# Altium footprint library 2S-Li-ion-Charger.PcbLib: 14 footprints
Each footprint in its own frame and in the unit in brackets; x right, y up, seen from the top. Pads: shape width x height; smd on the part's side, far side on the other; paste and mask are expansions set on the pad; w line width, h text height; cw(c..) or ccw(c..) is an arc to the next point about the centre after c.
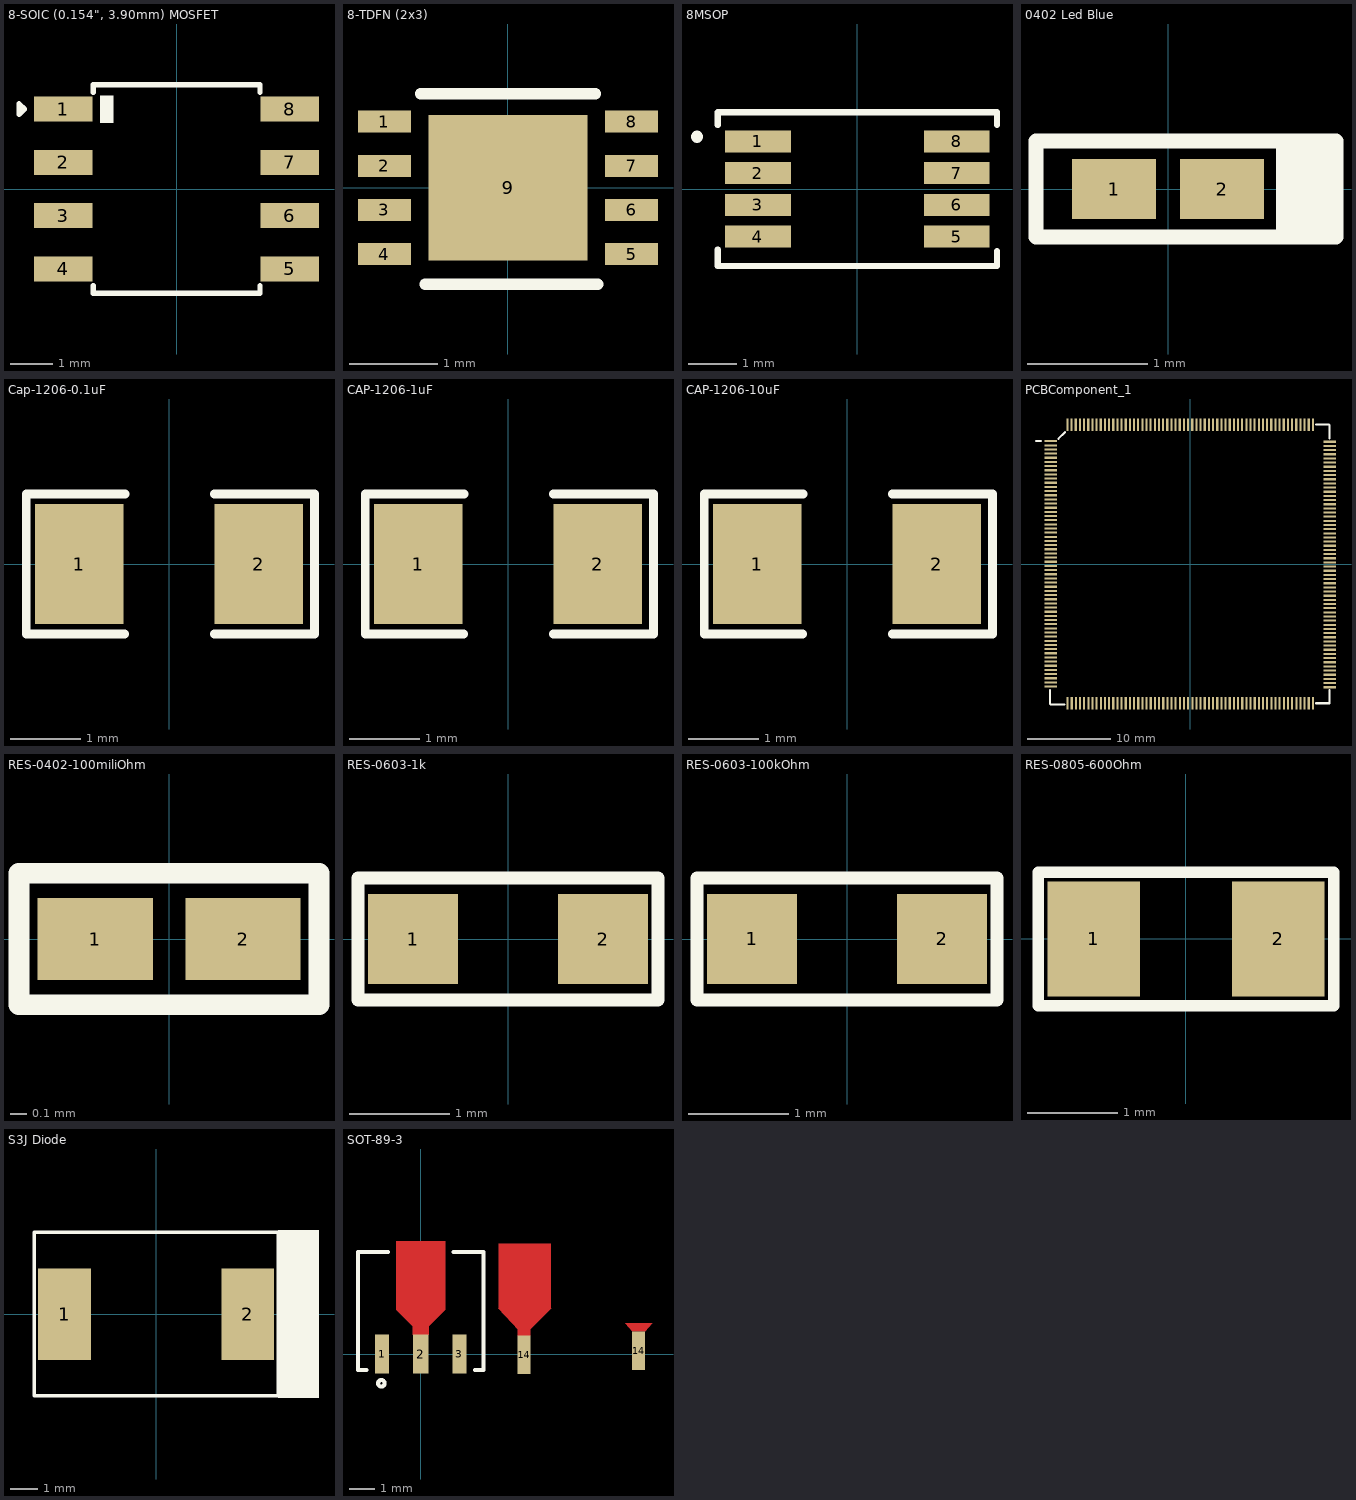
[diagram p0: the footprints below, top view; thin cyan lines are the x and y axes]

## 8-SOIC (0.154", 3.90mm) MOSFET [mm] "STS5P3LLH6"
pads (8):
  rect 1.4x0.6 smd: 1(-2.7,1.905) 2(-2.7,0.635) 3(-2.7,-0.635) 4(-2.7,-1.905) 5(2.7,-1.905) 6(2.7,-0.635) 7(2.7,0.635) 8(2.7,1.905)
Top Overlay:
  rectangle: -1.829,1.575 -1.499,2.235
  lines w0.127: -1.991,-2.311 -1.991,-2.489 1.991,-2.489 1.991,-2.311 ; -1.991,2.311 -1.991,2.489 1.991,2.489 1.991,2.311 ; -3.759,1.778 -3.632,1.905 -3.759,2.032 -3.759,1.778
3D body "User Library-SOIC-8-1.STEP": height 1.7, standoff -0.05, extent -3,-2.45 3,2.45

## 8-TDFN (2x3) [mm] "MAX17044"
pads (9):
  rect 0.6x0.25 smd: 1(-1.4,0.75) 2(-1.4,0.25) 3(-1.4,-0.25) 4(-1.4,-0.75) 5(1.4,-0.75) 6(1.4,-0.25) 7(1.4,0.25) 8(1.4,0.75)
  rect 1.8x1.65 smd: 9(0,0)
Top Overlay:
  lines w0.127: -0.991,1.067 0.991,1.067 ; -0.94,-1.092 1.016,-1.092
3D body "21-0174_T8231_MXM.step": height 0.81, standoff 0, extent -1.524,-1.029 1.524,1.029

## 8MSOP [mm] "MCP73844"
pads (8):
  rect 1.35x0.45 smd: 1(-2.037,0.975) 2(-2.037,0.325) 3(-2.037,-0.325) 4(-2.037,-0.975) 5(2.038,-0.975) 6(2.038,-0.325) 7(2.038,0.325) 8(2.038,0.975)
Top Overlay:
  lines w0.127: -2.863,-1.242 -2.863,-1.577 2.862,-1.577 2.862,-1.274 ; -2.863,1.311 -2.863,1.575 -1.431,1.575 1.431,1.575 2.862,1.575 2.862,1.317
  lines w0.254: -3.287,1.073 -3.287,1.073
3D body "MSOP8_MC_MCH.step": height 1.1, standoff 0, extent -2.512,-1.502 2.388,1.498

## 0402 Led Blue [mm] "APHHS1005QBC/D"
pads (2):
  rect 0.7x0.5 smd: 1(-0.45,0) 2(0.45,0)
Top Overlay:
  rectangle: 0.9,-0.4 1.4,0.4
  lines w0.127: -1.1,-0.4 1.4,-0.4 1.4,0.4 -1.1,0.4 -1.1,-0.4
3D body "LED_SMD_1XP5_KNB.step": height 0.51, standoff 0, extent -0.495,-0.254 0.495,0.254

## Cap-1206-0.1uF [mm] "T491A104K035AT"
pads (2):
  rect 1.25x1.7 smd: 1(-1.27,0) 2(1.27,0)
Top Overlay:
  lines w0.127: -0.627,-0.991 -2.018,-0.991 -2.018,0.991 -0.625,0.991 ; 0.641,0.991 2.057,0.991 2.057,-0.991 0.645,-0.991
3D body "User Library-1206 SMD Capacitor.step": height 1, standoff 0, extent -1.599,-0.799 1.601,0.801

## CAP-1206-1uF [mm] "T491A105K050AT"
pads (2):
  rect 1.25x1.7 smd: 1(-1.27,0) 2(1.27,0)
Top Overlay:
  lines w0.127: -0.627,-0.991 -2.018,-0.991 -2.018,0.991 -0.625,0.991 ; 0.641,0.991 2.057,0.991 2.057,-0.991 0.645,-0.991
3D body "User Library-1206 SMD Capacitor.step": height 1, standoff 0, extent -1.599,-0.799 1.601,0.801

## CAP-1206-10uF [mm] "T491A106K010AT"
pads (2):
  rect 1.25x1.7 smd: 1(-1.27,0) 2(1.27,0)
Top Overlay:
  lines w0.127: -0.627,-0.991 -2.018,-0.991 -2.018,0.991 -0.625,0.991 ; 0.641,0.991 2.057,0.991 2.057,-0.991 0.645,-0.991
3D body "User Library-1206 SMD Capacitor.step": height 1, standoff 0, extent -1.599,-0.799 1.601,0.801

## PCBComponent_1 [mil]
pads (240):
  rect 59.84x10 smd: 1(-659.87,581.36) 2(-659.87,561.68) 3(-659.87,541.99) 4(-659.87,522.31) 5(-659.87,502.62) 6(-659.87,482.94) 7(-659.87,463.25) 8(-659.87,443.57) 9(-659.87,423.88) 10(-659.87,404.2) 11(-659.87,384.51) 12(-659.87,364.83) 13(-659.87,345.14) 14(-659.87,325.46) 15(-659.87,305.77) 16(-659.87,286.09) 17(-659.87,266.4) 18(-659.87,246.72) 19(-659.87,227.03) 20(-659.87,207.35) 21(-659.87,187.66) 22(-659.87,167.98) 23(-659.87,148.29) 24(-659.87,128.61) 25(-659.87,108.92) 26(-659.87,89.24) 27(-659.87,69.55) 28(-659.87,49.87) 29(-659.87,30.18) 30(-659.87,10.5) 31(-659.87,-9.19) 32(-659.87,-28.87) 33(-659.87,-48.56) 34(-659.87,-68.24) 35(-659.87,-87.93) 36(-659.87,-107.61) 37(-659.87,-127.3) 38(-659.87,-146.98) 39(-659.87,-166.67) 40(-659.87,-186.35) 41(-659.87,-206.04) 42(-659.87,-225.72) 43(-659.87,-245.41) 44(-659.87,-265.09) 45(-659.87,-284.78) 46(-659.87,-304.46) 47(-659.87,-324.15) 48(-659.87,-343.83) 49(-659.87,-363.52) 50(-659.87,-383.2) 51(-659.87,-402.89) 52(-659.87,-422.57) 53(-659.87,-442.26) 54(-659.87,-461.94) 55(-659.87,-481.63) 56(-659.87,-501.31) 57(-659.87,-521) 58(-659.87,-540.68) 59(-659.87,-560.37) 60(-659.87,-580.05) 121(659.87,-583.12) 122(659.87,-563.44) 123(659.87,-543.75) 124(659.87,-524.07) 125(659.87,-504.38) 126(659.87,-484.7) 127(659.87,-465.01) 128(659.87,-445.33) 129(659.87,-425.64) 130(659.87,-405.96) 131(659.87,-386.27) 132(659.87,-366.59) 133(659.87,-346.9) 134(659.87,-327.22) 135(659.87,-307.53) 136(659.87,-287.85) 137(659.87,-268.16) 138(659.87,-248.48) 139(659.87,-228.79) 140(659.87,-209.11) 141(659.87,-189.42) 142(659.87,-169.74) 143(659.87,-150.05) 144(659.87,-130.37) 145(659.87,-110.68) 146(659.87,-91) 147(659.87,-71.31) 148(659.87,-51.63) 149(659.87,-31.94) 150(659.87,-12.26) 151(659.87,7.43) 152(659.87,27.11) 153(659.87,46.8) 154(659.87,66.48) 155(659.87,86.17) 156(659.87,105.85) 157(659.87,125.54) 158(659.87,145.22) 159(659.87,164.91) 160(659.87,184.59) 161(659.87,204.28) 162(659.87,223.96) 163(659.87,243.65) 164(659.87,263.33) 165(659.87,283.02) 166(659.87,302.7) 167(659.87,322.39) 168(659.87,342.07) 169(659.87,361.76) 170(659.87,381.44) 171(659.87,401.13) 172(659.87,420.81) 173(659.87,440.5) 174(659.87,460.18) 175(659.87,479.87) 176(659.87,499.55) 177(659.87,519.24) 178(659.87,538.92) 179(659.87,558.61) 180(659.87,578.29)
  rect 10x59.84 smd: 61(-580.73,-659.19) 62(-561.05,-659.19) 63(-541.36,-659.19) 64(-521.68,-659.19) 65(-501.99,-659.19) 66(-482.31,-659.19) 67(-462.62,-659.19) 68(-442.94,-659.19) 69(-423.25,-659.19) 70(-403.57,-659.19) 71(-383.88,-659.19) 72(-364.2,-659.19) 73(-344.51,-659.19) 74(-324.83,-659.19) 75(-305.14,-659.19) 76(-285.46,-659.19) 77(-265.77,-659.19) 78(-246.09,-659.19) 79(-226.4,-659.19) 80(-206.72,-659.19) 81(-187.03,-659.19) 82(-167.35,-659.19) 83(-147.66,-659.19) 84(-127.98,-659.19) 85(-108.29,-659.19) 86(-88.61,-659.19) 87(-68.92,-659.19) 88(-49.24,-659.19) 89(-29.55,-659.19) 90(-9.87,-659.19) 91(9.82,-659.19) 92(29.5,-659.19) 93(49.19,-659.19) 94(68.87,-659.19) 95(88.56,-659.19) 96(108.24,-659.19) 97(127.93,-659.19) 98(147.61,-659.19) 99(167.3,-659.19) 100(186.98,-659.19) 101(206.67,-659.19) 102(226.35,-659.19) 103(246.04,-659.19) 104(265.72,-659.19) 105(285.41,-659.19) 106(305.09,-659.19) 107(324.78,-659.19) 108(344.46,-659.19) 109(364.15,-659.19) 110(383.83,-659.19) 111(403.52,-659.19) 112(423.2,-659.19) 113(442.89,-659.19) 114(462.57,-659.19) 115(482.26,-659.19) 116(501.94,-659.19) 117(521.63,-659.19) 118(541.31,-659.19) 119(561,-659.19) 120(580.68,-659.19) 181(580.4,659.19) 182(560.71,659.19) 183(541.03,659.19) 184(521.34,659.19) 185(501.66,659.19) 186(481.97,659.19) 187(462.29,659.19) 188(442.6,659.19) 189(422.92,659.19) 190(403.23,659.19) 191(383.55,659.19) 192(363.86,659.19) 193(344.18,659.19) 194(324.49,659.19) 195(304.81,659.19) 196(285.12,659.19) 197(265.44,659.19) 198(245.75,659.19) 199(226.07,659.19) 200(206.38,659.19) 201(186.7,659.19) 202(167.01,659.19) 203(147.33,659.19) 204(127.64,659.19) 205(107.95,659.19) 206(88.27,659.19) 207(68.58,659.19) 208(48.9,659.19) 209(29.21,659.19) 210(9.53,659.19) 211(-10.16,659.19) 212(-29.84,659.19) 213(-49.53,659.19) 214(-69.21,659.19) 215(-88.9,659.19) 216(-108.58,659.19) 217(-128.27,659.19) 218(-147.95,659.19) 219(-167.64,659.19) 220(-187.32,659.19) 221(-207.01,659.19) 222(-226.69,659.19) 223(-246.38,659.19) 224(-266.06,659.19) 225(-285.75,659.19) 226(-305.43,659.19) 227(-325.12,659.19) 228(-344.8,659.19) 229(-364.49,659.19) 230(-384.17,659.19) 231(-403.86,659.19) 232(-423.54,659.19) 233(-443.23,659.19) 234(-462.91,659.19) 235(-482.6,659.19) 236(-502.28,659.19) 237(-521.97,659.19) 238(-541.65,659.19) 239(-561.34,659.19) 240(-581.02,659.19)
Top Overlay:
  lines w10: -729.99,582.26 -706.37,582.26 ; -663.06,-662.82 -663.06,-596.88 ; -661.09,-664.79 -596.13,-664.79 ; -624.34,591.95 -592.85,623.45 ; 596.04,-658.79 659.03,-658.79 659.03,-595.8 ; 596.04,660.11 655.09,660.11 659.03,656.17 659.03,593.18
3D body "PQFN240_A-4P10_INT.step": height 161.1, standoff 0, extent -681.97,-691.81 680,670.16

## RES-0402-100miliOhm [mm] "PE0402FRF470R1L"
pads (2):
  rect 0.7x0.5 smd: 1(-0.45,0) 2(0.45,0)
Top Overlay:
  lines w0.127: -0.914,-0.4 0.911,-0.4 0.911,0.4 -0.914,0.4 -0.914,-0.4
3D body "PE0402FRF470R1L.STEP": height 0.5, standoff 0, extent -0.475,-0.25 0.525,0.25

## RES-0603-1k [mm] "RT0603FRE071KL"
pads (2):
  rect 0.9x0.9 smd: 1(-0.95,0) 2(0.95,0)
Top Overlay:
  lines w0.127: -1.5,-0.61 -1.5,0.61 1.5,0.61 1.5,-0.61 -1.5,-0.61
3D body "RC0603N_YAG.step": height 0.71, standoff 0, extent -0.8,-0.406 0.8,0.406

## RES-0603-100kOhm [mm] "RT0603WRE07100KL"
pads (2):
  rect 0.9x0.9 smd: 1(-0.95,0) 2(0.95,0)
Top Overlay:
  lines w0.127: -1.5,-0.61 -1.5,0.61 1.5,0.61 1.5,-0.61 -1.5,-0.61
3D body "RC0603N_YAG.step": height 0.71, standoff 0, extent -0.8,-0.406 0.8,0.406

## RES-0805-600Ohm [mil] "CRCW0805600RFKEAHP"
pads (2):
  rect 40x50 smd: 1(-40,0) 2(40,0)
Top Overlay:
  lines w5: -64,-29 64,-29 64,29 -64,29 -64,-29
3D body "User Library-CR2012-0805.STEP": height 23.62, standoff 0, extent -39.34,-24.75 39.4,24.46

## S3J Diode [mm]
pads (2):
  rect 1.96x3.39 smd: 1(-3.4,0) 2(3.4,0)
Top Overlay:
  rectangle: 4.525,-3.099 6.049,3.124
  lines w0.127: -4.525,-3.025 4.525,-3.025 4.525,3.05 -4.525,3.05 -4.525,-3.025
  lines w0.254: 5.075,1 5.1,1 5.088,1
3D body "SMC.step": height 2.27, standoff 0, extent -3.97,-2.953 3.97,2.953

## SOT-89-3 [mm] "L78L33ACUTR Regulator"
pads (5):
  rect 0.533x1.499 smd paste+0: 1(-1.495,0) 3(1.495,0)
  rect 0.61x1.499 smd paste+0: 2(0,0)
  rect 0.5x1.5 smd: 14(4,-0.025) 14(8.425,0.125)
Top Layer:
  rectangle: 3.006,1.775 5.044,4.275
  rectangle: 3.75,0.7 4.25,1.075
  region: 8.675,0.875 8.95,1.2 7.9,1.2 8.175,0.875 7.925,0.875
  region: 4.194,0.925 5.044,1.775 3.006,1.775 3.79,0.925
  region: 0.305,0.749 -0.305,0.749 -0.305,1.079 -0.94,1.714 -0.94,4.356 0.94,4.356 0.94,1.714 0.305,1.079
Top Overlay:
  circle w0.152: c-1.524,-1.13 r0.127
  lines w0.152: -2.094,-0.622 -2.426,-0.622 -2.426,3.95 -1.273,3.95 ; 1.273,3.95 2.426,3.95 2.426,-0.622 2.094,-0.622
Top Paste:
  region: 0.305,0.724 -0.305,0.724 -0.305,1.079 -0.94,1.714 -0.94,4.102 0.94,4.102 0.94,1.714 0.305,1.079
Top Solder:
  region: 0.305,0.724 -0.305,0.724 -0.305,1.079 -0.94,1.714 -0.94,4.102 0.94,4.102 0.94,1.714 0.305,1.079
3D body "SOT-89_STM.step": height 1.65, standoff 0, extent -2.299,-0.444 2.299,3.798